# Altium footprint library Switch-TactileButton.PcbLib: 78 footprints (part 4 of 5)
Each footprint in its own frame and in the unit in brackets; x right, y up, seen from the top. Pads: shape width x height; smd on the part's side, far side on the other; paste and mask are expansions set on the pad; w line width, h text height; cw(c..) or ccw(c..) is an arc to the next point about the centre after c.
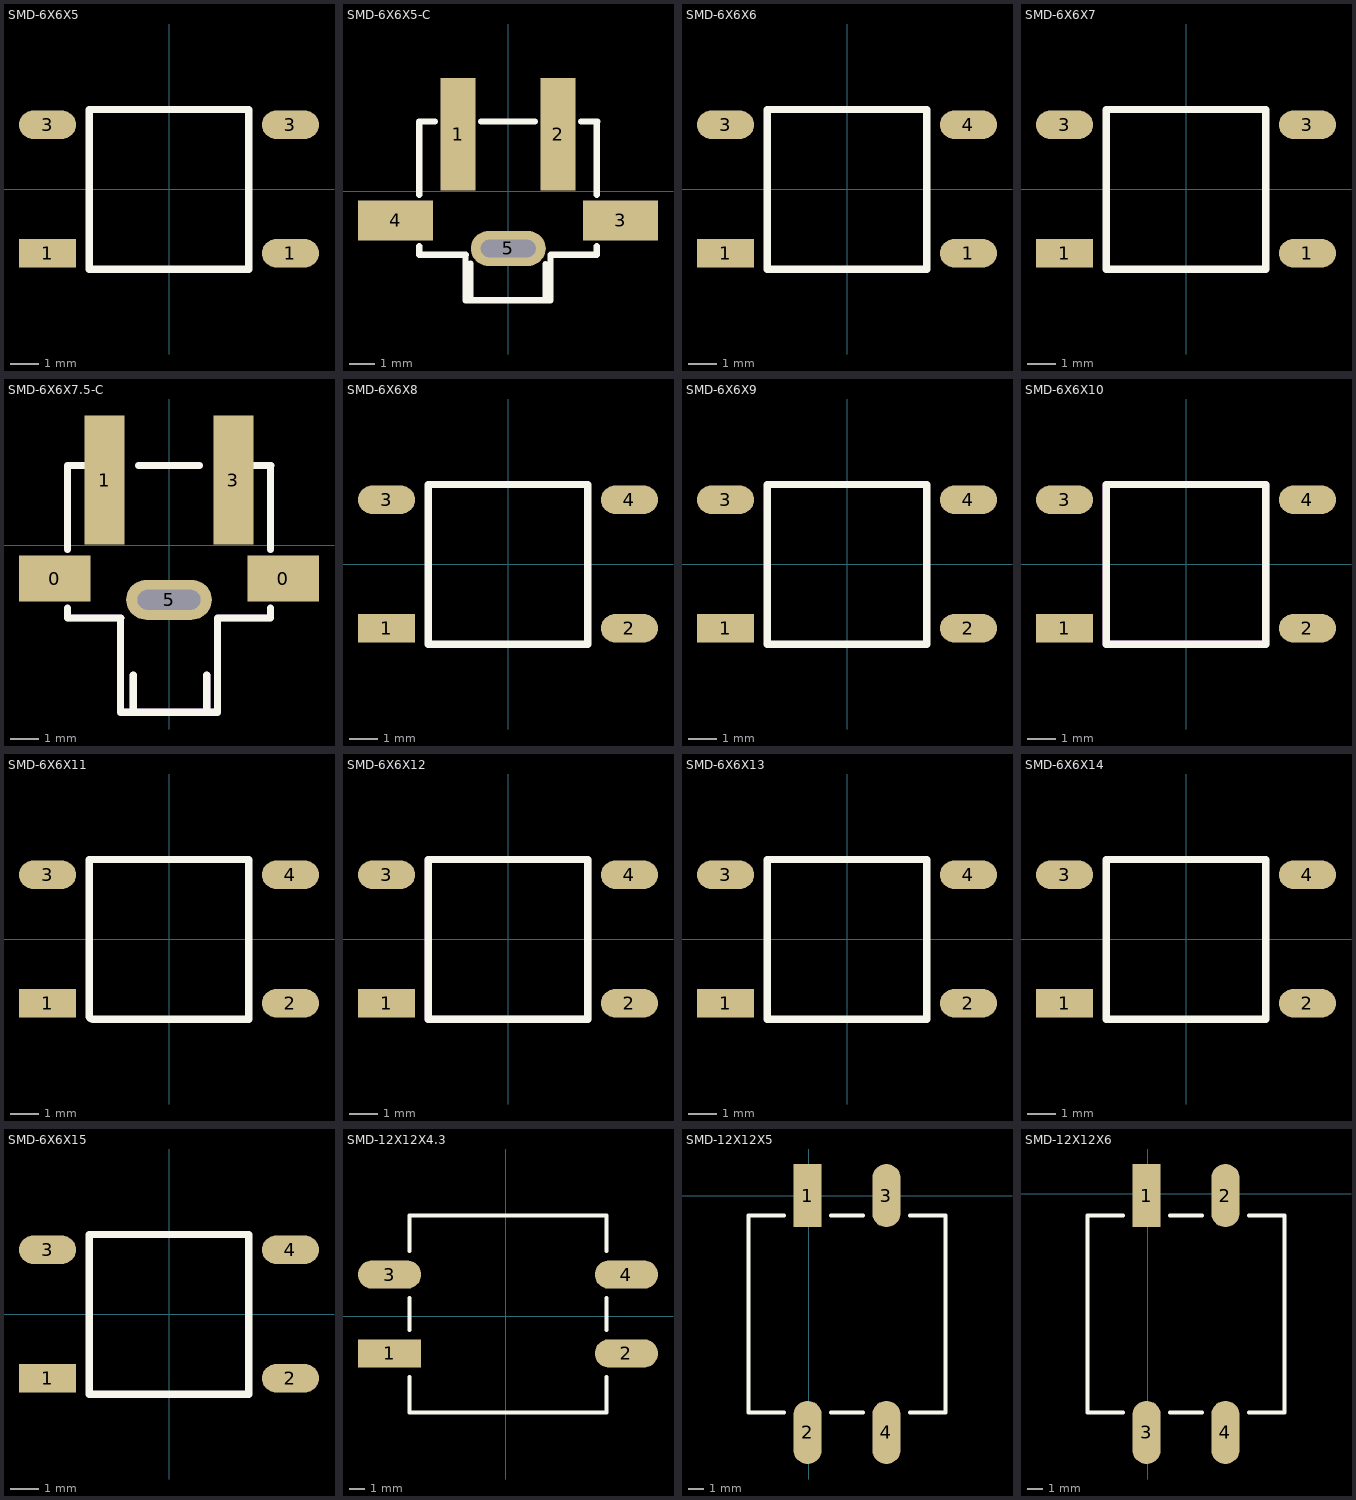
[diagram p3: the footprints below, top view; thin cyan lines are the x and y axes]

## SMD-6X6X5 [mm] "HCTL(华灿天禄) - TC-6601-5.5-260G - C2845320"
pads (4):
  rect 2x1 smd: 1(-4.25,-2.25)
  oval 2x1 smd: 1(4.25,-2.25) 3(-4.25,2.25) 3(4.25,2.25)
Top Overlay:
  lines w0.254: -2.794,-2.805 2.794,-2.805 2.794,2.783 -2.794,2.783 -2.794,-2.805
Top Value:
  text "'.Comment'" at -4.397,-0.581 h2
Top Designator:
  text "'.Designator'" at -5.677,-0.419 h2
3D body "SMD-6X6X5.STEP": height 4.95, standoff -0.03, extent -4.5,-2.963 4.5,3.037

## SMD-6X6X5-C [mm]
pads (5):
  rect 1.4x4.5 smd: 1(-2,2.286) 2(2,2.286)
  rect 3x1.6 smd: 3(4.5,-1.164) 4(-4.5,-1.164)
  oval 3x1.4 hole 0.7 slot 2.2 at 0 deg: 5(0.011,-2.286)
Top Overlay:
  lines w0.254: -3.556,-2.195 -3.556,-2.54 -1.685,-2.54 ; -3.556,-0.133 -3.556,2.286 -3.556,2.794 ; -3.545,2.794 -2.931,2.794 ; -1.7,-2.54 -1.7,-4.35 1.7,-4.35 1.7,-2.556 ; -1.5,-4.35 -1.5,-2.886 ; -1.069,2.794 1.069,2.794 ; 1.5,-4.35 1.5,-2.911 ; 1.706,-2.54 3.556,-2.54 3.556,-2.195 ; 2.931,2.794 3.567,2.794 ; 3.556,-0.133 3.556,2.286 3.556,2.794
Top Value:
  text "'.Comment'" at -4.397,-0.581 h2
Top Designator:
  text "'.Designator'" at -5.677,-0.419 h2
3D body "DIP-6X6X5_V.STEP": height 7.47, standoff -3.4, extent -4.438,-4.167 3.93,3.683

## SMD-6X6X6 [mm] "HCTL(华灿天禄) - TC-6601-6.0-260G"
pads (4):
  rect 2x1 smd: 1(-4.25,-2.25)
  oval 2x1 smd: 1(4.25,-2.25) 3(-4.25,2.25) 4(4.25,2.25)
Top Overlay:
  lines w0.254: -2.794,-2.805 -2.794,2.783 2.794,2.783 2.794,-2.805 -2.794,-2.805
Top Value:
  text "'.Comment'" at -4.397,-0.581 h2
Top Designator:
  text "'.Designator'" at -5.677,-0.419 h2
3D body "SMD-6X6X6.STEP": height 5.95, standoff -0.03, extent -4.627,-3.09 4.373,2.91

## SMD-6X6X7 [mm] "HCTL(华灿天禄) - TC-6601-7-260G - C2845326"
pads (4):
  rect 2x1 smd: 1(-4.25,-2.25)
  oval 2x1 smd: 1(4.25,-2.25) 3(-4.25,2.25) 3(4.25,2.25)
Top Overlay:
  lines w0.254: -2.794,-2.805 2.794,-2.805 2.794,2.783 -2.794,2.783 -2.794,-2.805
Top Value:
  text "'.Comment'" at -4.397,-0.581 h2
Top Designator:
  text "'.Designator'" at -5.677,-0.419 h2
3D body "SMD-6X6X7.STEP": height 6.95, standoff -0.03, extent -4.5,-2.962 4.5,3.037

## SMD-6X6X7.5-C [mm] "6*6*7.5mm 卧贴 轻触开关 Yuandi(元迪) TS-1037-A8B3-D2"
pads (5):
  rect 2.5x1.6 smd: 0(-4,-1.164) 0(4,-1.164)
  rect 1.4x4.5 smd: 1(-2.25,2.286) 3(2.25,2.286)
  oval 3x1.4 hole 0.7 slot 2.2 at 0 deg: 5(0,-1.905)
Top Overlay:
  lines w0.254: -3.556,-2.195 -3.556,-2.54 -1.685,-2.54 ; -3.556,-0.133 -3.556,2.286 -3.556,2.794 ; -3.545,2.794 -2.931,2.794 ; -1.7,-2.54 -1.7,-5.842 1.7,-5.842 1.7,-2.556 ; -1.247,-5.747 -1.247,-4.547 ; -1.069,2.794 1.069,2.794 ; 1.32,-5.747 1.32,-4.547 ; 1.706,-2.54 3.556,-2.54 3.556,-2.195 ; 2.931,2.794 3.567,2.794 ; 3.556,-0.133 3.556,2.286 3.556,2.794
Top Value:
  text "'.Comment'" at -4.397,-0.581 h2
Top Designator:
  text "'.Designator'" at -5.677,-0.419 h2
Top Assembly (Mech20):
  lines w0.254: -3.556,-2.195 -3.556,-2.54 -1.685,-2.54 ; -3.556,-0.133 -3.556,2.286 -3.556,2.794 ; -3.545,2.794 -2.931,2.794 ; -1.7,-2.54 -1.7,-5.842 1.7,-5.842 1.7,-2.556 ; -1.247,-5.747 -1.247,-4.547 ; -1.069,2.794 1.069,2.794 ; 1.32,-5.747 1.32,-4.547 ; 1.706,-2.54 3.556,-2.54 3.556,-2.195 ; 2.931,2.794 3.567,2.794 ; 3.556,-0.133 3.556,2.286 3.556,2.794
3D body "TS-1037-A8B3-D2.step": height 7.9, standoff -1.3, extent -4.5,-5.825 4.5,4.025

## SMD-6X6X8 [mm]
pads (4):
  rect 2x1 smd: 1(-4.25,-2.25)
  oval 2x1 smd: 2(4.25,-2.25) 3(-4.25,2.25) 4(4.25,2.25)
Top Overlay:
  lines w0.254: -2.794,-2.805 2.794,-2.805 2.794,2.783 -2.794,2.783 -2.794,-2.805
Top Value:
  text "'.Comment'" at -4.397,-0.581 h2
Top Designator:
  text "'.Designator'" at -5.677,-0.419 h2
3D body "SMD-6X6X8.STEP": height 7.95, standoff -0.03, extent -4.627,-3.089 4.373,2.91

## SMD-6X6X9 [mm]
pads (4):
  rect 2x1 smd: 1(-4.25,-2.25)
  oval 2x1 smd: 2(4.25,-2.25) 3(-4.25,2.25) 4(4.25,2.25)
Top Overlay:
  lines w0.254: -2.794,-2.805 2.794,-2.805 2.794,2.783 -2.794,2.783 -2.794,-2.805
3D body "SMD-6X6X9.STEP": height 8.95, standoff -0.03, extent -4.754,-2.963 4.246,3.037

## SMD-6X6X10 [mm]
pads (4):
  rect 2x1 smd: 1(-4.25,-2.25)
  oval 2x1 smd: 2(4.25,-2.25) 3(-4.25,2.25) 4(4.25,2.25)
Top Overlay:
  lines w0.254: -2.794,-2.805 2.794,-2.805 2.794,2.783 -2.794,2.783 -2.794,-2.805
Top Value:
  text "'.Comment'" at -4.397,-0.581 h2
Top Designator:
  text "'.Designator'" at -5.677,-0.419 h2
Top Assembly (Mech20):
  lines w0.254: -2.794,-2.805 -2.794,2.783 2.794,2.783 2.794,-2.805 -2.794,-2.805
3D body "SMD-6X6X10.STEP": height 9.95, standoff -0.03, extent -4.627,-2.963 4.373,3.037

## SMD-6X6X11 [mm]
pads (4):
  rect 2x1 smd: 1(-4.25,-2.25)
  oval 2x1 smd: 2(4.25,-2.25) 3(-4.25,2.25) 4(4.25,2.25)
Top Overlay:
  lines w0.254: -2.794,-2.678 ccw(c-2.667,-2.678) -2.667,-2.805 2.794,-2.805 2.794,2.783 -2.794,2.783 -2.794,-2.678
3D body "SMD-6X6X11.STEP": height 10.95, standoff -0.03, extent -4.627,-2.963 4.373,3.037

## SMD-6X6X12 [mm]
pads (4):
  rect 2x1 smd: 1(-4.25,-2.25)
  oval 2x1 smd: 2(4.25,-2.25) 3(-4.25,2.25) 4(4.25,2.25)
Top Overlay:
  lines w0.254: -2.794,-2.805 2.794,-2.805 2.794,2.783 -2.794,2.783 -2.794,-2.805
Top Value:
  text "'.Comment'" at -4.397,-0.581 h2
Top Designator:
  text "'.Designator'" at -5.677,-0.419 h2
Top Assembly (Mech20):
  lines w0.254: -2.794,-2.805 2.794,-2.805 2.794,2.783 -2.794,2.783 -2.794,-2.805
3D body "SMD-6X6X12.STEP": height 11.99, standoff 0.01, extent -4.754,-3.09 4.246,2.91

## SMD-6X6X13 [mm] "6*6*13mm"
pads (4):
  rect 2x1 smd: 1(-4.25,-2.25)
  oval 2x1 smd: 2(4.25,-2.25) 3(-4.25,2.25) 4(4.25,2.25)
Top Overlay:
  lines w0.254: -2.794,-2.805 -2.794,2.783 2.794,2.783 2.794,-2.805 -2.794,-2.805
3D body "SMD-6X6X13.STEP": height 12.95, standoff -0.03, extent -4.627,-2.963 4.373,3.037

## SMD-6X6X14 [mm]
pads (4):
  rect 2x1 smd: 1(-4.25,-2.25)
  oval 2x1 smd: 2(4.25,-2.25) 3(-4.25,2.25) 4(4.25,2.25)
Top Overlay:
  lines w0.254: -2.794,-2.805 -2.794,2.783 2.794,2.783 2.794,-2.805 -2.794,-2.805
3D body "SMD-6X6X14.STEP": height 13.95, standoff -0.03, extent -4.627,-2.963 4.373,3.037

## SMD-6X6X15 [mm]
pads (4):
  rect 2x1 smd: 1(-4.25,-2.25)
  oval 2x1 smd: 2(4.25,-2.25) 3(-4.25,2.25) 4(4.25,2.25)
Top Overlay:
  lines w0.254: -2.794,-2.805 2.794,-2.805 2.794,2.783 -2.794,2.783 -2.794,-2.805
3D body "SMD-6X6X15.STEP": height 14.95, standoff -0.03, extent -4.627,-3.059 4.373,2.941

## SMD-12X12X4.3 [mm]
pads (4):
  rect 4x1.8 smd: 1(-7.373,-2.373)
  oval 4x1.8 smd: 2(7.627,-2.373) 3(-7.373,2.627) 4(7.627,2.627)
Top Overlay:
  lines w0.254: -6.123,-3.873 -6.123,-6.123 6.377,-6.123 6.377,-3.873 ; -6.123,-0.873 -6.123,1.127 ; -6.123,4.127 -6.123,6.377 6.377,6.377 6.377,4.127 ; 6.377,-0.873 6.377,1.127
3D body "SMD-12X12X4.3.STEP": height 4.45, standoff 0, extent -7.727,-5.842 7.473,6.158

## SMD-12X12X5 [mm]
pads (4):
  rect 1.8x4 smd: 1(-0.087,0.007)
  oval 1.8x4 smd: 2(-0.087,-14.993) 3(4.913,0.007) 4(4.913,-14.993)
Top Overlay:
  lines w0.254: -1.587,-13.743 -3.837,-13.743 -3.837,-1.243 -1.587,-1.243 ; 1.413,-13.743 3.413,-13.743 ; 1.413,-1.243 3.413,-1.243 ; 6.413,-13.743 8.663,-13.743 8.663,-1.243 6.413,-1.243
3D body "SMD-12X12X5.STEP": height 5.15, standoff 0, extent -3.683,-14.966 8.317,0.234

## SMD-12X12X6 [mm]
pads (4):
  rect 1.8x4 smd: 1(-0.087,-0.12)
  oval 1.8x4 smd: 2(4.913,-0.12) 3(-0.087,-15.12) 4(4.913,-15.12)
Top Overlay:
  lines w0.254: -1.587,-13.87 -3.837,-13.87 -3.837,-1.37 -1.587,-1.37 ; 1.413,-13.87 3.413,-13.87 ; 1.413,-1.37 3.413,-1.37 ; 6.413,-13.87 8.663,-13.87 8.663,-1.37 6.413,-1.37
3D body "SMD-12X12X6.STEP": height 6.15, standoff 0, extent -3.714,-15.113 8.286,0.087